# Altium footprint library PcbLib1.PcbLib: 332 footprints (part 4 of 22)
Each footprint in its own frame and in the unit in brackets; x right, y up, seen from the top. Pads: shape width x height; smd on the part's side, far side on the other; paste and mask are expansions set on the pad; w line width, h text height; cw(c..) or ccw(c..) is an arc to the next point about the centre after c.
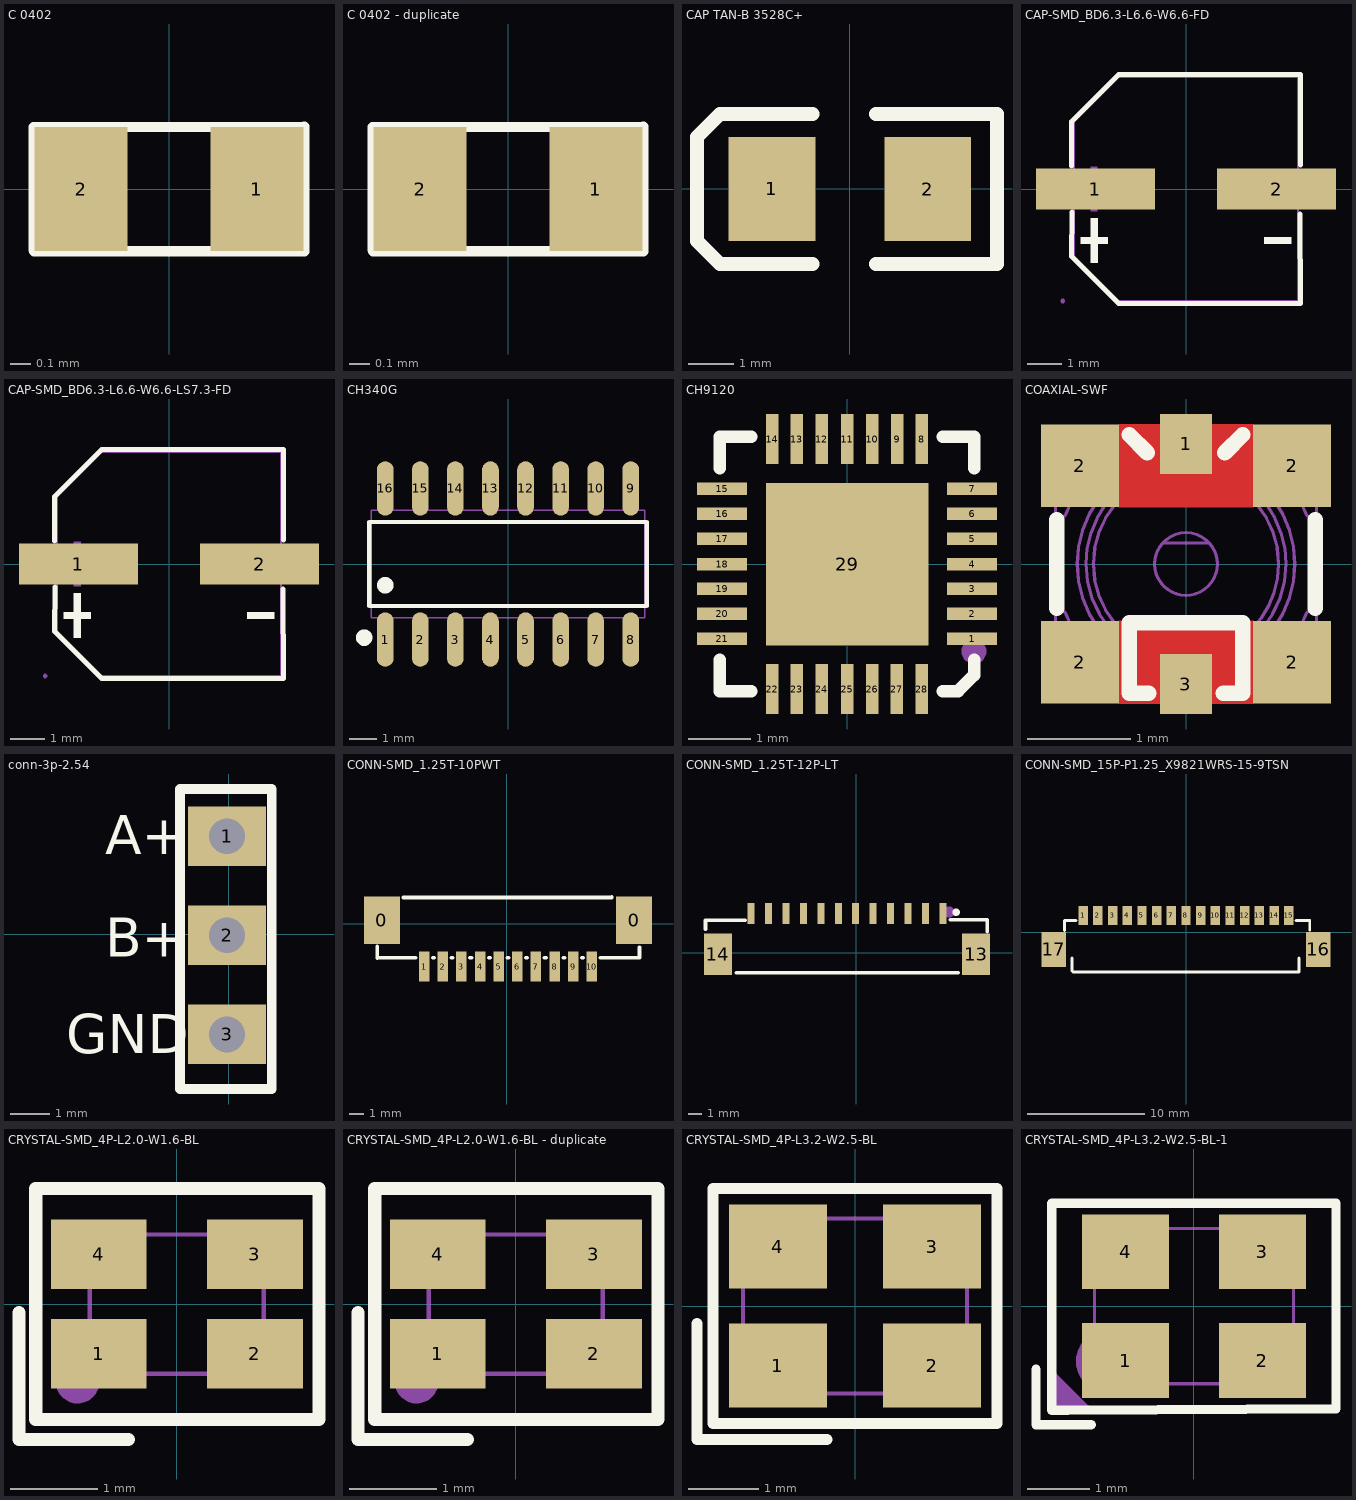
[diagram p3: the footprints below, top view; thin cyan lines are the x and y axes]

## C 0402 [mm]
pads (2):
  rect 0.45x0.6 smd mask+0.051: 1(0.425,0) 2(-0.425,0)
Top Overlay:
  lines w0.05: -0.653,-0.295 -0.653,0.299 ; -0.653,0.3 0.653,0.3 ; -0.652,-0.3 0.653,-0.3 0.653,0.301
3D body "User Library-RES_1005-0402.STEP": height 0.41, standoff 0, extent -0.575,-0.275 0.575,0.275

## C 0402 - duplicate [mm]
pads (2):
  rect 0.45x0.6 smd mask+0.051: 1(0.425,0) 2(-0.425,0)
Top Overlay:
  lines w0.05: -0.653,-0.295 -0.653,0.299 ; -0.653,0.3 0.653,0.3 ; -0.652,-0.3 0.653,-0.3 0.653,0.301
3D body "User Library-RES_1005-0402.STEP": height 0.41, standoff 0, extent -0.575,-0.275 0.575,0.275

## CAP TAN-B 3528C+ [mil]
height 39.37
pads (2):
  rect 75x90 smd: 1(-67.5,0) 2(67.5,0)
Top Overlay:
  lines w12: -32.5,-65 -112.5,-65 -132.5,-45 -132.5,45 -112.5,65 -32.5,65 ; 22.5,-65 127.5,-65 127.5,65 22.5,65
3D body "User Library-CaseB_3528-21.step": height 74.8, standoff 0, extent -68.9,-55.12 68.9,55.11

## CAP-SMD_BD6.3-L6.6-W6.6-FD [mm]
pads (2):
  rect 3.5x1.2 smd paste+0 mask+0.051: 1(-2.67,0) 2(2.67,0)
Top Overlay:
  region: -2.805,-0.858 -2.805,-2.178 -2.607,-2.178 -2.607,-0.858
  region: -3.102,-1.419 -3.102,-1.617 -2.31,-1.617 -2.31,-1.419
  region: 3.102,-1.419 3.102,-1.617 2.31,-1.617 2.31,-1.419
  lines w0.152: -3.376,0.686 -3.376,1.98 -1.98,3.376 3.376,3.376 3.369,0.708 ; -3.362,-0.686 -3.376,-1.981 -1.981,-3.376 3.376,-3.376 3.356,-0.739
Mechanical 6:
  region: -2.81,0.66 -2.81,-0.66 -2.612,-0.66 -2.612,0.66
  region: -3.102,0.099 -3.102,-0.099 -2.31,-0.099 -2.31,0.099
  region: 3.102,0.099 3.102,-0.099 2.31,-0.099 2.31,0.099
Mechanical 15:
  region: -3.634,0.325 -1.034,0.325 -1.034,-0.325 -3.634,-0.325
  region: 1.067,0.325 3.667,0.325 3.667,-0.325 1.067,-0.325
  region: -3.574,-3.3 -3.574,-3.275 -3.609,-3.24 -3.659,-3.24 -3.694,-3.275 -3.694,-3.3 -3.694,-3.325 -3.659,-3.36 -3.609,-3.36 -3.574,-3.325 -3.574,-3.3
  lines w0.051: -3.3,-1.98 -3.3,1.98 -1.98,3.3 3.3,3.3 3.3,-3.3 -1.98,-3.3 -3.3,-1.98

## CAP-SMD_BD6.3-L6.6-W6.6-LS7.3-FD [mm]
pads (2):
  rect 3.5x1.2 smd paste+0 mask+0.051: 1(-2.67,0) 2(2.67,0)
Top Overlay:
  region: 3.102,-1.419 3.102,-1.617 2.31,-1.617 2.31,-1.419
  region: -3.102,-1.419 -3.102,-1.617 -2.31,-1.617 -2.31,-1.419
  region: -2.805,-0.858 -2.805,-2.178 -2.607,-2.178 -2.607,-0.858
  lines w0.152: -3.376,0.686 -3.376,1.98 -1.98,3.376 3.376,3.376 3.369,0.708 ; -3.362,-0.686 -3.376,-1.981 -1.981,-3.376 3.376,-3.376 3.356,-0.739
Mechanical 6:
  region: 3.102,0.099 3.102,-0.099 2.31,-0.099 2.31,0.099
  region: -3.102,0.099 -3.102,-0.099 -2.31,-0.099 -2.31,0.099
  region: -2.805,0.66 -2.805,-0.66 -2.607,-0.66 -2.607,0.66
Mechanical 15:
  region: -3.652,0.35 -1.002,0.35 -1.002,-0.35 -3.652,-0.35
  region: 0.999,0.35 3.649,0.35 3.649,-0.35 0.999,-0.35
  region: -3.592,-3.3 -3.592,-3.275 -3.627,-3.24 -3.676,-3.24 -3.712,-3.275 -3.712,-3.3 -3.712,-3.325 -3.676,-3.36 -3.627,-3.36 -3.592,-3.325 -3.592,-3.3
  lines w0.051: -3.3,-1.98 -3.3,1.98 -1.98,3.3 3.3,3.3 3.3,-3.3 -1.98,-3.3 -3.3,-1.98

## CH340G [mm]
pads (16):
  oval 0.602x1.971 smd: 1(-4.445,-2.736) 2(-3.175,-2.736) 3(-1.905,-2.736) 4(-0.635,-2.736) 5(0.635,-2.736) 6(1.905,-2.736) 7(3.175,-2.736) 8(4.445,-2.736) 9(4.445,2.736) 10(3.175,2.736) 11(1.905,2.736) 12(0.635,2.736) 13(-0.635,2.736) 14(-1.905,2.736) 15(-3.175,2.736) 16(-4.445,2.736)
Top Overlay:
  circle w0.3: c-4.445,-0.769 r0.15
  circle w0.3: c-5.207,-2.667 r0.15
  lines w0.152: -5.026,-1.521 -5.026,1.521 5.026,1.521 5.026,-1.521 -5.026,-1.521
Mechanical 6:
  lines w0.051: -4.95,-1.95 -4.95,1.95 4.95,1.95 4.95,-1.95 -4.95,-1.95
Mechanical 7:
  region: -4.66,-2.31 -4.66,-1.94 -4.23,-1.94 -4.23,-2.31
  region: -3.39,-2.31 -3.39,-1.94 -2.96,-1.94 -2.96,-2.31
  region: -2.12,-2.31 -2.12,-1.94 -1.69,-1.94 -1.69,-2.31
  region: -0.85,-2.31 -0.85,-1.94 -0.42,-1.94 -0.42,-2.31
  region: 0.42,-2.31 0.42,-1.94 0.85,-1.94 0.85,-2.31
  region: 1.69,-2.31 1.69,-1.94 2.12,-1.94 2.12,-2.31
  region: 2.96,-2.31 2.96,-1.94 3.39,-1.94 3.39,-2.31
  region: 4.23,-2.31 4.23,-1.94 4.66,-1.94 4.66,-2.31
  region: -4.66,2.31 -4.66,1.94 -4.23,1.94 -4.23,2.31
  region: -3.39,2.31 -3.39,1.94 -2.96,1.94 -2.96,2.31
  region: -2.12,2.31 -2.12,1.94 -1.69,1.94 -1.69,2.31
  region: -0.85,2.31 -0.85,1.94 -0.42,1.94 -0.42,2.31
  region: 0.42,2.31 0.42,1.94 0.85,1.94 0.85,2.31
  region: 1.69,2.31 1.69,1.94 2.12,1.94 2.12,2.31
  region: 2.96,2.31 2.96,1.94 3.39,1.94 3.39,2.31
  region: 4.23,2.31 4.23,1.94 4.66,1.94 4.66,2.31
Mechanical 9:
  region: -4.66,-3 -4.66,-2.3 -4.23,-2.3 -4.23,-3
  region: -3.39,-3 -3.39,-2.3 -2.96,-2.3 -2.96,-3
  region: -2.12,-3 -2.12,-2.3 -1.69,-2.3 -1.69,-3
  region: -0.85,-3 -0.85,-2.3 -0.42,-2.3 -0.42,-3
  region: 0.42,-3 0.42,-2.3 0.85,-2.3 0.85,-3
  region: 1.69,-3 1.69,-2.3 2.12,-2.3 2.12,-3
  region: 2.96,-3 2.96,-2.3 3.39,-2.3 3.39,-3
  region: 4.23,-3 4.23,-2.3 4.66,-2.3 4.66,-3
  region: -4.66,3 -4.66,2.3 -4.23,2.3 -4.23,3
  region: -3.39,3 -3.39,2.3 -2.96,2.3 -2.96,3
  region: -2.12,3 -2.12,2.3 -1.69,2.3 -1.69,3
  region: -0.85,3 -0.85,2.3 -0.42,2.3 -0.42,3
  region: 0.42,3 0.42,2.3 0.85,2.3 0.85,3
  region: 1.69,3 1.69,2.3 2.12,2.3 2.12,3
  region: 2.96,3 2.96,2.3 3.39,2.3 3.39,3
  region: 4.23,3 4.23,2.3 4.66,2.3 4.66,3

## CH9120 [mm]
pads (29):
  rect 0.8x0.2 smd: 1(2,-1.2) 2(2,-0.8) 3(2,-0.4) 4(2,0) 5(2,0.4) 6(2,0.8) 7(2,1.2) 15(-2,1.2) 16(-2,0.8) 17(-2,0.4) 18(-2,0) 19(-2,-0.4) 20(-2,-0.8) 21(-2,-1.2)
  rect 0.2x0.8 smd: 8(1.2,2) 9(0.8,2) 10(0.4,2) 11(0,2) 12(-0.4,2) 13(-0.8,2) 14(-1.2,2) 22(-1.2,-2) 23(-0.8,-2) 24(-0.4,-2) 25(0,-2) 26(0.4,-2) 27(0.8,-2) 28(1.2,-2)
  rect 2.6x2.6 smd: 29(0,0)
Top Overlay:
  lines w0.2: -2.032,-1.651 -2.032,-1.531 -2.032,-2.032 -1.531,-2.032 ; -2.032,1.531 -2.032,2.032 -1.531,2.032 ; 1.531,-2.032 1.778,-2.032 2.032,-1.778 2.032,-1.531 ; 1.531,2.032 2.032,2.032 2.032,1.531
Mechanical 15:
  circle w0.2: c2.032,-1.397 r0.1

## COAXIAL-SWF [mm]
pads (6):
  rect 0.5x0.58 smd: 1(0,1.16) 3(0,-1.16)
  rect 0.75x0.8 smd: 2(-1.025,0.95) 2(-1.025,-0.95) 2(1.025,0.95) 2(1.025,-0.95)
Top Layer:
  pour cut-out: -0.65,0.55 0.65,0.55 0.65,1.35 -0.65,1.35
  pour cut-out: 0.65,-0.55 -0.65,-0.55 -0.65,-1.35 0.65,-1.35
Top Overlay:
  lines w0.15: -1.25,-0.43 -1.25,0.43 ; -0.55,1.25 -0.375,1.075 ; -0.36,-1.25 -0.55,-1.25 -0.55,-0.57 0.55,-0.57 0.55,-1.25 0.36,-1.25 ; 0.375,1.075 0.55,1.25 ; 1.25,-0.43 1.25,0.43
Mechanical 7:
  drawing of 206 lines, arcs and shapes, not listed
3D body: height 1.4, standoff 0.6, extent -0.9,-0.9 0.9,0.901
3D body: height 0.75, standoff 0.6, extent -1.05,-1.049 1.05,1.05
3D body: height 0.95, standoff 0.75, extent -1,-0.999 1,1.001
3D body: height 0.6, standoff 0, extent 0.757,0.655 1.262,1.249
3D body: height 0.6, standoff 0, extent 0.757,-1.246 1.262,-0.653
3D body: height 0.6, standoff 0, extent -1.262,-1.25 -0.757,-0.649
3D body: height 0.6, standoff 0, extent -1.262,0.655 -0.757,1.248
3D body: height 0.55, standoff 0.1, extent -1.262,-1.252 1.262,1.253
3D body: height 0.9, standoff 0.6, extent -1.05,-1.049 1.05,1.05
3D body: height 1.25, standoff 0.95, extent -1.05,-1.049 1.05,1.05
3D body: height 1.55, standoff 1.25, extent -1.05,-1.05 1.05,1.05
3D body: height 0.15, standoff 0, extent -0.227,-1.301 0.227,-0.758
3D body: height 0.15, standoff 0, extent -0.227,0.899 0.227,1.299
3D body: height 0.6, standoff 0.55, extent -1.262,-1.248 1.262,1.251

## conn-3p-2.54 [mil]
pads (3):
  rect 78.74x60 hole 36 paste-99999 mask+2: 1(-1.5,98.99) 2(-1.5,-1.01) 3(-1.5,-101.01)
Top Overlay:
  lines w10: -49,-156.01 43.5,-156.01 43.5,146.49 -49,146.49 -49,-156.01
  text "A+" at -124.1,80.62 h39.37
  text "B+" at -124.1,-22.89 h39.37
  text "GND" at -163.64,-120.18 h39.37
Mechanical 15:
  lines w0.1: -2.51,7.49 -2.49,7.51

## CONN-SMD_1.25T-10PWT [mm]
pads (12):
  rect 2.4x3.2 smd paste+0 mask+0.051: 0(-8.388,0.222) 0(8.525,0.224)
  rect 0.7x2 smd paste+0 mask+0.051: 1(-5.557,-2.882) 2(-4.307,-2.882) 3(-3.057,-2.882) 4(-1.807,-2.882) 5(-0.557,-2.882) 6(0.693,-2.882) 7(1.943,-2.882) 8(3.193,-2.882) 9(4.443,-2.882) 10(5.693,-2.882)
Top Overlay:
  lines w0.254: -8.695,-1.532 -8.695,-2.294 -8.686,-2.285 -6.138,-2.285 ; -6.957,1.761 7.004,1.761 7.022,1.779 ; -4.976,-2.285 -4.888,-2.285 ; -3.726,-2.285 -3.638,-2.285 ; -2.476,-2.285 -2.388,-2.285 ; -1.226,-2.285 -1.138,-2.285 ; 0.024,-2.285 0.112,-2.285 ; 1.274,-2.285 1.362,-2.285 ; 2.524,-2.285 2.612,-2.285 ; 3.774,-2.285 3.862,-2.285 ; 5.024,-2.285 5.112,-2.285 ; 6.274,-2.285 8.891,-2.285 8.891,-1.608

## CONN-SMD_1.25T-12P-LT [mm]
pads (14):
  rect 0.5x1.524 smd paste+0 mask+0.05: 1(6.22,2.828) 2(4.97,2.828) 3(3.721,2.828) 4(2.471,2.828) 5(1.221,2.828) 6(-0.029,2.828) 7(-1.279,2.828) 8(-2.529,2.828) 9(-3.779,2.828) 10(-5.029,2.828) 11(-6.279,2.828) 12(-7.529,2.828)
  rect 2x3 smd paste+0 mask+0.05: 13(8.595,-0.103) 14(-9.904,-0.103)
Top Overlay:
  circle w0.254: c7.165,2.908 r0.141
  lines w0.254: -10.795,1.688 -10.795,2.328 -7.955,2.328 ; -8.595,-1.432 7.325,-1.432 ; 6.755,2.368 9.405,2.368 9.405,1.528
Mechanical 15:
  circle w0.4: c6.645,2.928 r0.2

## CONN-SMD_15P-P1.25_X9821WRS-15-9TSN [mm]
pads (17):
  rect 0.8x1.6 smd: 1(-8.75,1.45) 2(-7.5,1.45) 3(-6.25,1.45) 4(-5,1.45) 5(-3.75,1.45) 6(-2.5,1.45) 7(-1.25,1.45) 8(0,1.45) 9(1.25,1.45) 10(2.5,1.45) 11(3.75,1.45) 12(5,1.45) 13(6.25,1.45) 14(7.5,1.45) 15(8.75,1.45)
  rect 2.1x3 smd: 16(11.275,-1.45) 17(-11.275,-1.45)
Top Overlay:
  lines w0.254: -10.35,0.18 -10.35,1.03 -9.381,1.03 ; -9.725,-3.275 -9.725,-2.181 ; -9.625,-3.375 9.625,-3.375 9.625,-2.181 ; 9.381,1.03 10.54,1.03 10.54,0.21
3D body "X9821WRS-15-9TSN.stp": height 3.69, standoff -0.01, extent -11.955,-3.175 11.955,2.075

## CRYSTAL-SMD_4P-L2.0-W1.6-BL [mil]
pads (4):
  rect 43.3x31.5 smd mask+2: 1(-35.4,-22.6) 2(35.4,-22.6) 3(35.4,22.6) 4(-35.4,22.6)
Top Overlay:
  lines w6: -71.5,-3.9 -71.5,-61.3 -22,-61.3 ; -63.9,-52.3 -60.2,-52.3 64.4,-52.3 64.4,52.3 -63.9,52.3 -63.9,-52.3
Mechanical 6:
  circle w10: c-45,-35 r5
Mechanical 15:
  region: -37,-31.5 -37,-30.51 -38.41,-29.1 -40.39,-29.1 -41.8,-30.51 -41.8,-31.5 -41.8,-32.49 -40.39,-33.9 -38.41,-33.9 -37,-32.49 -37,-31.5
  region: -37.4,10.8 -37.4,29.5 -14.8,29.5 -14.8,10.8
  region: -37.4,-29.5 -37.4,-10.8 -14.8,-10.8 -14.8,-29.5
  region: 37.4,-10.8 37.4,-29.5 14.8,-29.5 14.8,-10.8
  region: 37.4,29.5 37.4,10.8 14.8,10.8 14.8,29.5
  lines w2: -39.4,-31.5 -39.4,31.5 39.4,31.5 39.4,-31.5 -39.4,-31.5

## CRYSTAL-SMD_4P-L2.0-W1.6-BL - duplicate [mil]
pads (4):
  rect 43.3x31.5 smd mask+2: 1(-35.4,-22.6) 2(35.4,-22.6) 3(35.4,22.6) 4(-35.4,22.6)
Top Overlay:
  lines w6: -71.5,-3.9 -71.5,-61.3 -22,-61.3 ; -63.9,-52.3 -63.9,52.3 64.4,52.3 64.4,-52.3 -60.2,-52.3 -63.9,-52.3
Mechanical 6:
  circle w10: c-45,-35 r5
Mechanical 15:
  region: 37.4,29.5 37.4,10.8 14.8,10.8 14.8,29.5
  region: 37.4,-10.8 37.4,-29.5 14.8,-29.5 14.8,-10.8
  region: -37.4,-29.5 -37.4,-10.8 -14.8,-10.8 -14.8,-29.5
  region: -37.4,10.8 -37.4,29.5 -14.8,29.5 -14.8,10.8
  region: -37,-31.5 -37,-30.51 -38.41,-29.1 -40.39,-29.1 -41.8,-30.51 -41.8,-31.5 -41.8,-32.49 -40.39,-33.9 -38.41,-33.9 -37,-32.49 -37,-31.5
  lines w2: -39.4,-31.5 39.4,-31.5 39.4,31.5 -39.4,31.5 -39.4,-31.5

## CRYSTAL-SMD_4P-L3.2-W2.5-BL [mm]
pads (4):
  rect 1.4x1.2 smd paste+0 mask+0.051: 1(-1.1,-0.85) 2(1.1,-0.85) 3(1.1,0.85) 4(-1.1,0.85)
Top Overlay:
  lines w0.152: -2.257,-0.25 -2.257,-1.907 -0.4,-1.907 ; -2.029,-1.678 2.029,-1.678 2.029,1.679 -2.029,1.679 -2.029,-1.678
Mechanical 6:
  circle w0.36: c-1.143,-0.889 r0.18
Mechanical 15:
  region: -1.5,-0.35 -0.6,-0.35 -0.6,-1.15 -1.5,-1.15
  region: 0.6,-0.35 1.5,-0.35 1.5,-1.15 0.6,-1.15
  region: 0.6,1.15 1.5,1.15 1.5,0.35 0.6,0.35
  region: -1.5,1.15 -0.6,1.15 -0.6,0.35 -1.5,0.35
  region: -1.54,-1.25 -1.54,-1.225 -1.575,-1.19 -1.625,-1.19 -1.66,-1.225 -1.66,-1.25 -1.66,-1.275 -1.625,-1.31 -1.575,-1.31 -1.54,-1.275 -1.54,-1.25
  lines w0.051: -1.6,-1.25 1.6,-1.25 1.6,1.25 -1.6,1.25 -1.6,-1.25

## CRYSTAL-SMD_4P-L3.2-W2.5-BL-1 [mm]
pads (4):
  rect 1.4x1.2 smd mask+0.051: 1(-1.1,-0.875) 2(1.1,-0.875) 3(1.1,0.875) 4(-1.1,0.875)
Top Overlay:
  lines w0.152: -2.54,-1.016 -2.54,-1.778 -2.54,-1.905 -1.651,-1.905 ; -2.286,-1.679 -2.03,-1.679 2.286,-1.651 2.286,0 2.286,1.651 -2.286,1.651 -2.286,-1.679
Mechanical 6:
  circle w0.5: c-1.397,-0.889 r0.25
  region: -2.286,-1.016 -2.286,-1.651 -1.651,-1.651
Mechanical 15:
  region: -1.54,-1.25 -1.54,-1.225 -1.575,-1.19 -1.625,-1.19 -1.66,-1.225 -1.66,-1.25 -1.66,-1.275 -1.625,-1.31 -1.575,-1.31 -1.54,-1.275 -1.54,-1.25
  region: 0.45,-0.35 1.5,-0.35 1.5,-1.15 0.45,-1.15
  region: -1.5,-0.35 -0.45,-0.35 -0.45,-1.15 -1.5,-1.15
  region: -1.5,1.15 -0.45,1.15 -0.45,0.35 -1.5,0.35
  region: 0.45,1.15 1.5,1.15 1.5,0.35 0.45,0.35
  lines w0.051: -1.6,-1.25 -1.6,1.25 1.6,1.25 1.6,-1.25 -1.6,-1.25